# Altium integrated library Power jack.IntLib: 1 symbol
Pins are listed as number, name and electrical type; pins without a type are passive.

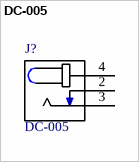
[diagram p0: symbol DC-005]

## DC-005
designator J?
MF: Littelfuse Inc.; Package: 0603 Ninigi; MP: DC-005; SnapEDA_Link: https://www.snapeda.com/parts/DC-005/Littelfuse%20Inc./view-part/?ref=snap; Availability: Unavailable; Price: None; Value: *
footprint *NINIGI_DC-005
pins: 2 4, 3 5, 4 2